# Altium schematic symbol library SCH - CONNECTORS - MOLEX 35318-0820.SCHLIB: 1 symbol
Pins are listed as number, name and electrical type; pins without a type are passive.

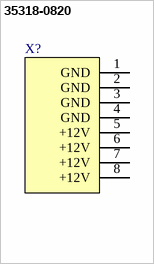
[diagram p0: symbol 35318-0820]

## 35318-0820
designator X?
pins: 1 GND, 2 GND, 3 GND, 4 GND, 5 +12V (power), 6 +12V (power), 7 +12V (power), 8 +12V (power)